# Altium footprint library 轻触开关.PcbLib: 62 footprints (part 3 of 4)
Each footprint in its own frame and in the unit in brackets; x right, y up, seen from the top. Pads: shape width x height; smd on the part's side, far side on the other; paste and mask are expansions set on the pad; w line width, h text height; cw(c..) or ccw(c..) is an arc to the next point about the centre after c.
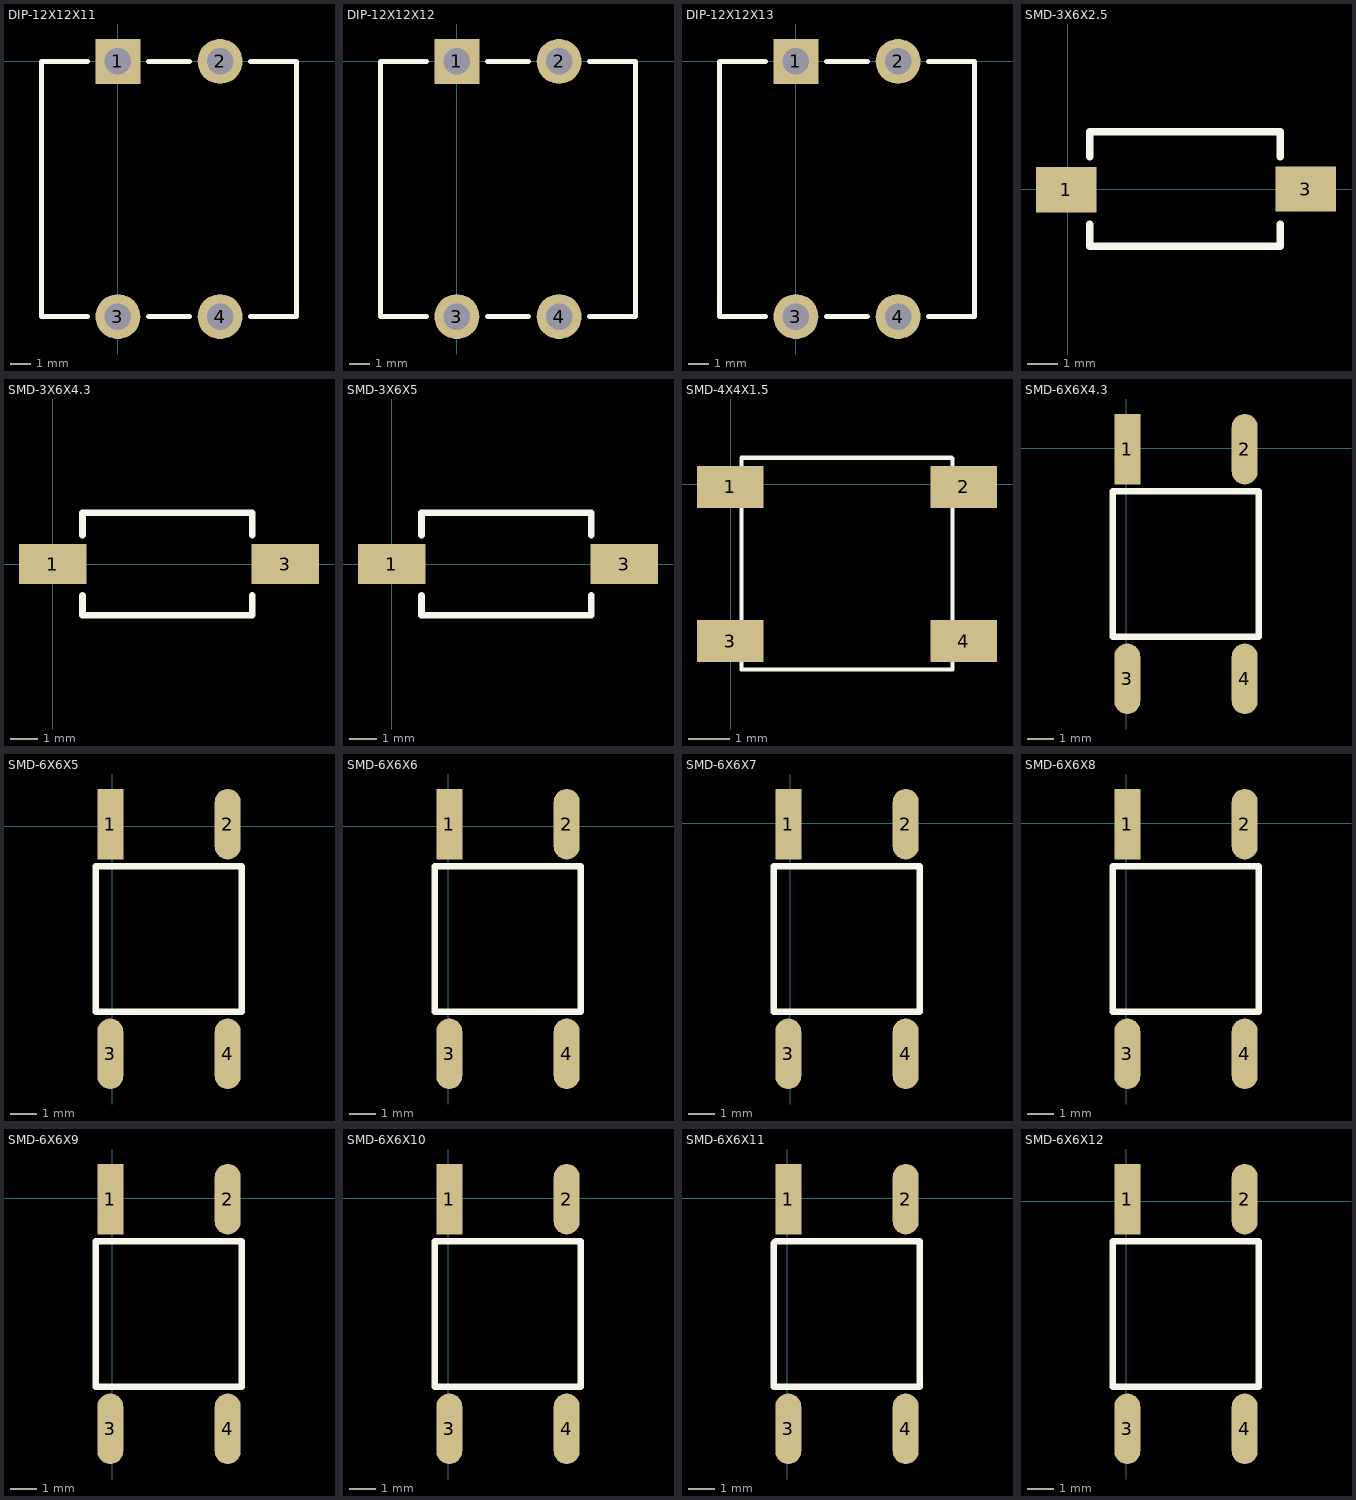
[diagram p2: the footprints below, top view; thin cyan lines are the x and y axes]

## DIP-12X12X11 [mm]
pads (4):
  rect 2.2x2.2 hole 1.3: 1(0,0)
  round 2.2 hole 1.3: 2(5,0) 3(0,-12.5) 4(5,-12.5)
Top Overlay:
  lines w0.254: -1.5,-12.5 -3.75,-12.5 -3.75,0 -1.5,0 ; 1.5,-12.5 3.5,-12.5 ; 1.5,0 3.5,0 ; 6.5,-12.5 8.75,-12.5 8.75,0 6.5,0
3D body "DIP-12X12X11.STEP": height 11.15, standoff -3.35, extent -3.46,-13.208 8.54,0.589

## DIP-12X12X12 [mm]
pads (4):
  rect 2.2x2.2 hole 1.3: 1(0,0)
  round 2.2 hole 1.3: 2(5,0) 3(0,-12.5) 4(5,-12.5)
Top Overlay:
  lines w0.254: -1.5,-12.5 -3.75,-12.5 -3.75,0 -1.5,0 ; 1.5,-12.5 3.5,-12.5 ; 1.5,0 3.5,0 ; 6.5,-12.5 8.75,-12.5 8.75,0 6.5,0
3D body "DIP-12X12X12.STEP": height 12.15, standoff -3.35, extent -3.46,-13.081 8.54,0.716

## DIP-12X12X13 [mm]
pads (4):
  rect 2.2x2.2 hole 1.3: 1(0,0)
  round 2.2 hole 1.3: 2(5,0) 3(0,-12.5) 4(5,-12.5)
Top Overlay:
  lines w0.254: -1.5,-12.5 -3.75,-12.5 -3.75,0 -1.5,0 ; 1.5,-12.5 3.5,-12.5 ; 1.5,0 3.5,0 ; 6.5,-12.5 8.75,-12.5 8.75,0 6.5,0
3D body "DIP-12X12X13.STEP": height 13.31, standoff -3.19, extent -3.46,-13.208 8.54,0.589

## SMD-3X6X2.5 [mm]
pads (2):
  rect 2x1.5 smd: 1(-0.059,-0.02) 3(7.874,0)
Top Overlay:
  lines w0.254: 0.725,-1.168 0.725,-1.9 7.025,-1.9 7.025,-1.168 ; 0.725,1.067 0.725,1.9 7.025,1.9 7.025,1.067
3D body "SMD-3X6X2.5.STEP": height 2.59, standoff -0.03, extent -0.19,-1.778 7.81,1.722

## SMD-3X6X4.3 [mm]
pads (2):
  rect 2.5x1.5 smd: 1(0,0) 3(8.636,0)
Top Overlay:
  lines w0.254: 1.106,-1.168 1.106,-1.9 7.406,-1.9 7.406,-1.168 ; 1.106,1.067 1.106,1.9 7.406,1.9 7.406,1.067
3D body "SMD-3X6X4.3.STEP": height 4.4, standoff -0.03, extent -0.409,-1.778 8.791,1.722

## SMD-3X6X5 [mm]
pads (2):
  rect 2.5x1.5 smd: 1(0,0) 3(8.636,0)
Top Overlay:
  lines w0.254: 1.106,-1.168 1.106,-1.9 7.406,-1.9 7.406,-1.168 ; 1.106,1.067 1.106,1.9 7.406,1.9 7.406,1.067
3D body "SMD-3X6X5.STEP": height 5.1, standoff -0.03, extent -0.409,-1.722 8.791,1.778

## SMD-4X4X1.5 [mm]
pads (4):
  rect 1.6x1 smd: 1(-0.006,-0.065) 2(5.594,-0.065) 3(-0.006,-3.765) 4(5.594,-3.765)
Top Overlay:
  lines w0.1: 5.304,0.635 1.524,0.635 0.264,0.635 0.264,-4.445 5.324,-4.445 5.324,0.615
Mechanical 15:
  lines w0.1: -0.406,-4.015 -0.406,-3.515 0.573,-3.515 ; 5.015,-0.315 5.994,-0.315 5.994,0.185
3D body "SMD-4X4X1.5.STEP": height 2.38, standoff 0.88, extent -0.533,-4.572 5.867,0.628

## SMD-6X6X4.3 [mm]
pads (4):
  rect 1x2.7 smd: 1(0.047,-0.045)
  oval 1x2.7 smd: 2(4.547,-0.045) 3(0.047,-8.845) 4(4.547,-8.845)
Top Overlay:
  lines w0.254: -0.508,-7.239 -0.508,-1.651 5.08,-1.651 5.08,-7.239 -0.508,-7.239
3D body "SMD-6X6X4.3.STEP": height 4.25, standoff 0.05, extent -0.635,-8.818 5.365,0.182

## SMD-6X6X5 [mm]
pads (4):
  rect 1x2.7 smd: 1(-0.08,0.082)
  oval 1x2.7 smd: 2(4.42,0.082) 3(-0.08,-8.718) 4(4.42,-8.718)
Top Overlay:
  lines w0.254: -0.635,-7.112 4.953,-7.112 4.953,-1.524 -0.635,-1.524 -0.635,-7.112
3D body "SMD-6X6X5.STEP": height 4.95, standoff -0.03, extent -0.793,-8.818 5.207,0.182

## SMD-6X6X6 [mm]
pads (4):
  rect 1x2.7 smd: 1(0.047,0.082)
  oval 1x2.7 smd: 2(4.547,0.082) 3(0.047,-8.718) 4(4.547,-8.718)
Top Overlay:
  lines w0.254: -0.508,-7.112 5.08,-7.112 5.08,-1.524 -0.508,-1.524 -0.508,-7.112
3D body "SMD-6X6X6.STEP": height 5.95, standoff -0.03, extent -0.793,-8.691 5.207,0.309

## SMD-6X6X7 [mm]
pads (4):
  rect 1x2.7 smd: 1(-0.08,-0.045)
  oval 1x2.7 smd: 2(4.42,-0.045) 3(-0.08,-8.845) 4(4.42,-8.845)
Top Overlay:
  lines w0.254: -0.635,-7.239 -0.635,-1.651 4.953,-1.651 4.953,-7.239 -0.635,-7.239
3D body "SMD-6X6X7.STEP": height 6.95, standoff -0.03, extent -0.793,-8.945 5.207,0.055

## SMD-6X6X8 [mm]
pads (4):
  rect 1x2.7 smd: 1(0.047,-0.045)
  oval 1x2.7 smd: 2(4.547,-0.045) 3(0.047,-8.845) 4(4.547,-8.845)
Top Overlay:
  lines w0.254: -0.508,-7.239 5.08,-7.239 5.08,-1.651 -0.508,-1.651 -0.508,-7.239
3D body "SMD-6X6X8.STEP": height 7.95, standoff -0.03, extent -0.793,-8.818 5.207,0.182

## SMD-6X6X9 [mm]
pads (4):
  rect 1x2.7 smd: 1(-0.08,-0.045)
  oval 1x2.7 smd: 2(4.42,-0.045) 3(-0.08,-8.845) 4(4.42,-8.845)
Top Overlay:
  lines w0.254: -0.635,-7.239 -0.635,-1.651 4.953,-1.651 4.953,-7.239 -0.635,-7.239
3D body "SMD-6X6X9.STEP": height 8.95, standoff -0.03, extent -0.793,-8.691 5.207,0.309

## SMD-6X6X10 [mm]
pads (4):
  rect 1x2.7 smd: 1(0.047,-0.045)
  oval 1x2.7 smd: 2(4.547,-0.045) 3(0.047,-8.845) 4(4.547,-8.845)
Top Overlay:
  lines w0.254: -0.508,-7.239 5.08,-7.239 5.08,-1.651 -0.508,-1.651 -0.508,-7.239
3D body "SMD-6X6X10.STEP": height 9.95, standoff -0.03, extent -0.666,-8.818 5.334,0.182

## SMD-6X6X11 [mm]
pads (4):
  rect 1x2.7 smd: 1(0.047,-0.045)
  oval 1x2.7 smd: 2(4.547,-0.045) 3(0.047,-8.845) 4(4.547,-8.845)
Top Overlay:
  lines w0.254: -0.508,-7.239 5.08,-7.239 5.08,-1.651 -0.381,-1.651 ccw(c-0.381,-1.778) -0.508,-1.778 -0.508,-7.239
3D body "SMD-6X6X11.STEP": height 10.95, standoff -0.03, extent -0.666,-8.818 5.334,0.182

## SMD-6X6X12 [mm]
pads (4):
  rect 1x2.7 smd: 1(0.047,0.082)
  oval 1x2.7 smd: 2(4.547,0.082) 3(0.047,-8.718) 4(4.547,-8.718)
Top Overlay:
  lines w0.254: -0.508,-7.112 -0.508,-1.524 5.08,-1.524 5.08,-7.112 -0.508,-7.112
3D body "SMD-6X6X12.STEP": height 13.64, standoff 1.66, extent -0.793,-8.564 5.207,0.436